# Altium footprint library 可调稳压模块.PcbLib: 6 footprints
Each footprint in its own frame and in the unit in brackets; x right, y up, seen from the top. Pads: shape width x height; smd on the part's side, far side on the other; paste and mask are expansions set on the pad; w line width, h text height; cw(c..) or ccw(c..) is an arc to the next point about the centre after c.
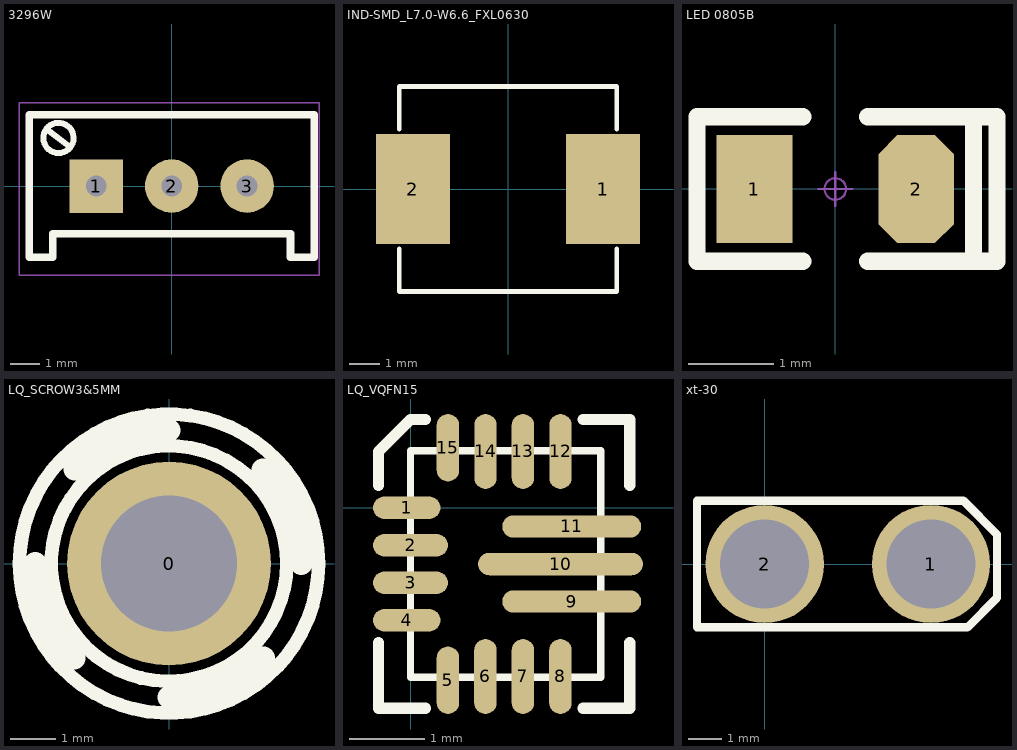
[diagram p0: the footprints below, top view; thin cyan lines are the x and y axes]

## 3296W [mm] "Precise Multi-Winding Adjustable Resistor"
pads (3):
  rect 1.8x1.8 hole 0.7: 1(-2.54,0)
  round 1.8 hole 0.7: 2(0,0) 3(2.54,0)
Top Overlay:
  lines w0.2: -3.302,1.651 ccw(c-3.81,1.618) -3.301,1.608
  lines w0.203: -4.2,1.9 -3.464,1.348
  lines w0.254: -4.8,-2.4 -4,-2.4 -4,-1.6 4,-1.6 4,-2.4 4.8,-2.4 4.8,2.4 -4.8,2.4 -4.8,-2.4
Mechanical 15:
  lines w0.05: -5.14,-3 -5.14,2.8 4.96,2.8 4.96,-3 -5.14,-3
3D body "3296.STEP": height 11.52, standoff -3.48, extent -4.75,-2.4 4.75,2.4

## IND-SMD_L7.0-W6.6_FXL0630 [mm]
pads (2):
  rect 2.424x3.62 smd: 1(3.128,0) 2(-3.128,0)
Top Overlay:
  lines w0.152: -3.576,-1.962 -3.576,-3.376 3.576,-3.376 3.576,-1.962 ; -3.576,1.962 -3.576,3.376 3.576,3.376 3.576,1.962

## LED 0805B [mil] "蓝色0805LED"
pads (2):
  rect 35x50 smd: 1(-37.4,-0.01)
  oct 35x50 smd: 2(37.4,-0.01)
Top Overlay:
  lines w8: -15,-33.47 -63.98,-33.47 -63.98,33.46 -15,33.46 ; 15,-33.47 74.8,-33.47 74.8,33.46 15,33.46 ; 63.98,-33.47 63.98,32.48
Mechanical 15:
  circle w1: c0,0 r5
  lines w1: -7.87,0 7.87,0 ; 0,-7.87 0,7.87
3D body "LED 0805玻璃罩.STEP": height 31.69, standoff 12.01, extent -29.53,-24.61 29.53,24.6
3D body "LED 0805-B.STEP": height 26.33, standoff -0.16, extent -39.36,-24.64 39.37,24.65

## LQ_SCROW3&5MM [mm]
pads (1):
  round 4.5 hole 3: 0(0,0)
Top Overlay:
  circle w0.3: c0,0 r3.3
  circle w0.3: c0,0 r2.6
  lines w0.5: -2.952,0 ccw(c0,0) -2.088,-2.088 ; -2.081,2.081 cw(c0,0) 0,2.943 ; 0,-2.95 ccw(c0,0) 2.086,-2.086 ; 2.066,2.066 cw(c0,0) 2.922,0
Bottom Overlay:
  circle w0.3: c0,-0.02 r2.6
  circle w0.3: c0,-0.02 r3.3
  lines w0.5: -2.952,-0.02 ccw(c0,-0.02) -2.088,-2.108 ; -2.081,2.061 cw(c0,-0.02) 0,2.923 ; 0,-2.97 ccw(c0,-0.02) 2.086,-2.106 ; 2.066,2.046 cw(c0,-0.02) 2.922,-0.02
3D body "LQ_SCREW3X5.stp": height 1.3, standoff -8.1, extent -3,-3 3,3

## LQ_VQFN15 [mm]
pads (15):
  oval 0.9x0.3 smd: 1(-0.05,0) 4(-0.05,-1.5)
  oval 1x0.3 smd: 2(0,-0.5) 3(0,-1)
  oval 0.3x0.9 smd: 5(0.5,-2.3) 15(0.5,0.8)
  oval 0.3x1 smd: 6(1,-2.25) 7(1.5,-2.25) 8(2,-2.25) 12(2,0.75) 13(1.5,0.75) 14(1,0.75)
  oval 1.85x0.3 smd: 9(2.15,-1.25) 11(2.15,-0.25)
  oval 2.2x0.3 smd: 10(2,-0.75)
Top Overlay:
  lines w0.1: 0,-2.261 0,0 0,0.762 2.54,0.762 2.54,-2.261 0,-2.261
  lines w0.15: -0.425,-1.8 -0.425,-2.675 0.2,-2.675 ; -0.425,0.3 -0.425,0.75 0,1.175 0.2,1.175 ; 2.3,-2.675 2.925,-2.675 2.925,-1.8 ; 2.3,1.175 2.925,1.175 2.925,0.3

## xt-30 [mil] "长：16mm，宽：8.2mm，高：16mm"
pads (2):
  round 140 hole 105: 1(196.85,0) 2(0,0)
Top Overlay:
  lines w10: -80,-75 -80,75 235,75 275,35 275,-40 240,-75 -80,-75